# Altium footprint library DIOMELF3514N.PcbLib: 1 footprints
Each footprint in its own frame and in the unit in brackets; x right, y up, seen from the top. Pads: shape width x height; smd on the part's side, far side on the other; paste and mask are expansions set on the pad; w line width, h text height; cw(c..) or ccw(c..) is an arc to the next point about the centre after c.
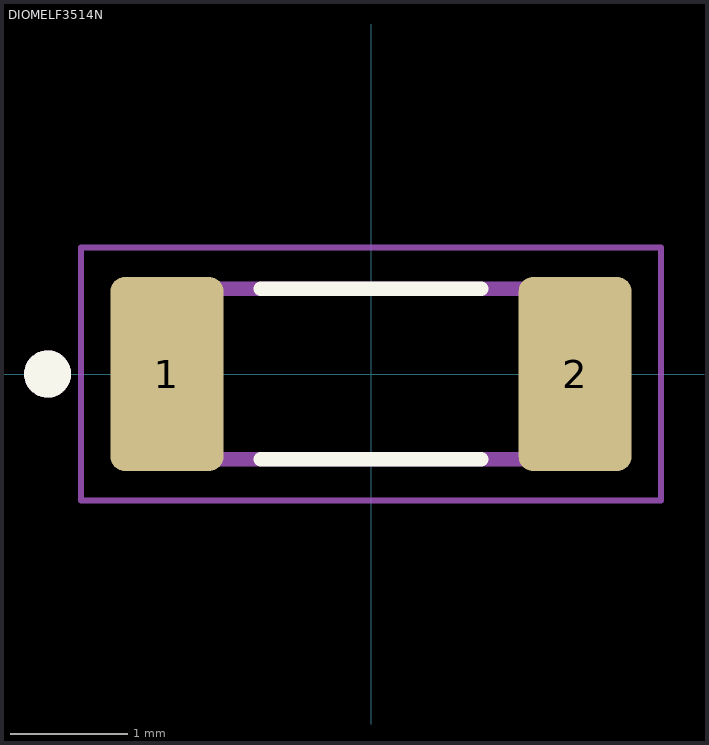
[diagram p0: the footprint, top view; thin cyan lines are the x and y axes]

## DIOMELF3514N [mm]
height 1.5
pads (2):
  rrect25% 0.96x1.65 smd paste+0 mask+0.102: 1(-1.735,0) 2(1.735,0)
Top Overlay:
  circle w0.2: c-2.75,0 r0.1
  lines w0.127: -0.935,-0.725 0.935,-0.725 ; -0.935,0.725 0.935,0.725
Assembly Top:
  circle w0.2: c-2.75,0 r0.1
  lines w0.127: -1.75,-0.725 1.75,-0.725 1.75,0.725 -1.75,0.725 -1.75,-0.725
Courtyard Top:
  lines w0.05: -2.465,-1.075 2.465,-1.075 2.465,1.075 -2.465,1.075 -2.465,-1.075